# Altium schematic symbol library P_MOSFET.SchLib: 9 symbols
Pins are listed as number, name and electrical type; pins without a type are passive.

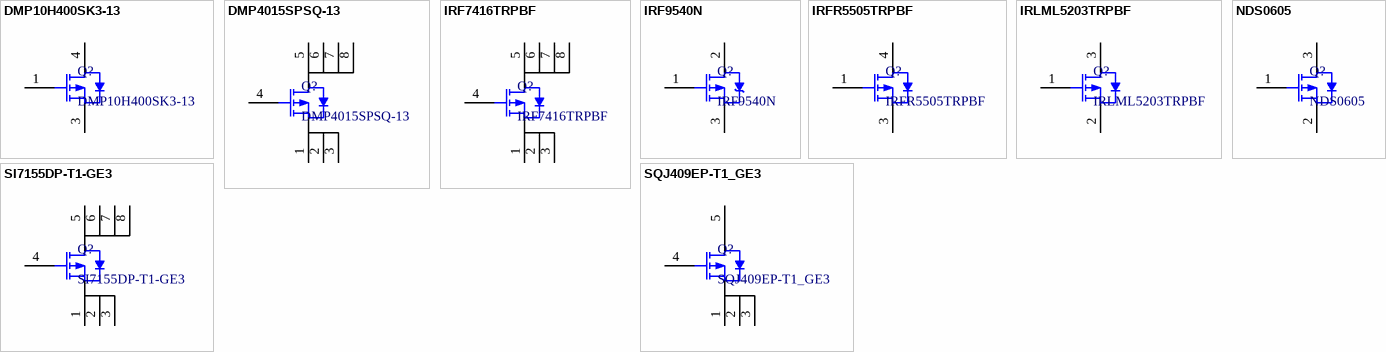
[diagram p0: symbols DMP10H400SK3-13 to SQJ409EP-T1_GE3]

## DMP10H400SK3-13
designator Q?
100V 9A 42W 240mΩ@10V,5A 3V@250uA P Channel TO-252-2 MOSFETs ROHS; Manufacturer: Diodes Incorporated; Drain to Source Voltage (Vdss): -100V; Gate Threshold Voltage (Vth): -1 V; Gate-to-Source Voltage (VGS): ±20V; Drain-to-Source On-Resistance: 240 mOhms; Continuous Drain Current: -9 A; Total Gate Charge: 17.5 nC; FET Type: P-Channel; Power Dissipation: 42 W; ComponentLink1Description: Datasheet; ComponentLink1URL: https://www.lcsc.com/datasheet/lcsc_datasheet_2005180933_Diodes-Incorporated-DMP10H400SK3-13_C177034.pdf; Supplier 1 URL: https://www.mouser.vn/ProductDetail/Diodes-Incorporated/DMP10H400SK3-13?qs=wo71MgyKIyFqONaMc85PEA%3D%3D; Supplier 2 URL: N/A; Supplier 3 URL: N/A; Value: DMP10H400SK3-13; Manufacturer Part Number: DMP10H400SK3-13; Mount: SMD/SMT; Operating Temperature Max: + 85 C; Operating Temperature Min: - 40 C; Package / Case: DPAK-3 (TO-252-3); Packaging: Tape and Reel; Supplier 1: Mouser; Supplier 1 Part Number: 621-DMP10H400SK3-13; Supplier 2: Digi-Key; Supplier 2 Part Number: N/A; Supplier 3: thegioiic; Supplier 3 Part Number: N/A; LCSC Part #: C177034
footprint TO-252-3 (D-PAK, 3-Pads, Body 6.20x6.54mm (max), IPC Medium Density)
pins: 1 G, 3 S, 4 D

## DMP4015SPSQ-13
designator Q?
MOSFET P-CH 40V 11A PowerDI5060-8; Manufacturer: Diodes Incorporated; Continuous Drain Current: -8.5 A; Drain to Source Voltage (Vdss): -40 V; Drain-to-Source On-Resistance: 15 mOhms; FET Type: P-Channel; Gate Threshold Voltage (Vth): -1.5 V; Gate-to-Source Voltage (VGS): ±25V; Power Dissipation: 1.3 W; Total Gate Charge: 47.5 nC; ComponentLink1Description: Datasheet; ComponentLink1URL: https://www.lcsc.com/datasheet/C384564.pdf?spm=wm.fly.bg.50.pdf&lcsc_vid=FlkIUABWQVJeAgZfQwdWUlcFT1ZYUV1ST1deUwVWQ1IxVlNfRVRZVVNVR1BYUztW; LCSC Part #: C384564; Manufacturer Part Number: DMP4015SPSQ-13; Mount: SMD/SMT; Operating Temperature Max: + 85 C; Operating Temperature Min: - 40 C; Package / Case: PowerDI5060-8; Packaging: Tape and Reel; Supplier 1 Part Number: 621-DMP4015SPSQ-13; Supplier 1 URL: https://www.mouser.vn/en/ProductDetail/Diodes-Incorporated/DMP4015SPSQ-13?qs=DBvH5xl4UymGq%252BG09rHkpA%3D%3D; Supplier 1: Mouser; Supplier 2 Part Number: DMP4015SPSQ-13DITR-ND; Supplier 2 URL: https://www.digikey.com/en/products/detail/diodes-incorporated/dmp4015spsq-13/5514393; Supplier 2: Digi-Key; Supplier 3 Part Number: N/A; Supplier 3 URL: N/A; Supplier 3: thegioiic; Value: DMP4015SPSQ-13
footprint DMP4015SPSQ-13
pins: 1 S, 2 S, 3 S, 4 G, 5 D, 6 D, 7 D, 8 D

## IRF7416TRPBF
designator Q?
MOSFET P-CH 30V 10A SO-8; Manufacturer: Infineon Technologies; Continuous Drain Current: -10 A; Drain to Source Voltage (Vdss): -30 V; Drain-to-Source On-Resistance: 20 mOhms; FET Type: P-Channel; Gate Threshold Voltage (Vth): -1 V; Gate-to-Source Voltage (VGS): ±20V; Power Dissipation: 2.5 W; Total Gate Charge: 92 nC; ComponentLink1Description: Datasheet; ComponentLink1URL: https://www.lcsc.com/datasheet/C3000.pdf?spm=wm.fly.bg.0.pdf___wm.fly.tp.2.ml&lcsc_vid=FlkIUABWQVJeAgZfQwdWUlcFT1ZYUV1ST1deUwVWQ1IxVlNfRVRZVVNVR1BYUztW; LCSC Part #: C3000; Manufacturer Part Number: IRF7416TRPBF; Mount: SMD/SMT; Operating Temperature Max: + 85 C; Operating Temperature Min: - 40 C; Package / Case: SO-8; Packaging: Tape and Reel; Supplier 1 Part Number: 942-IRF7416TRPBF; Supplier 1 URL: https://www.mouser.vn/en/ProductDetail/Infineon-Technologies/IRF7416TRPBF?qs=9%252BKlkBgLFf1tuhXoEVAcyA%3D%3D; Supplier 1: Mouser; Supplier 2 Part Number: IRF7416TRPBFTR-ND; Supplier 2 URL: https://www.digikey.com/en/products/detail/infineon-technologies/irf7416trpbf/856470; Supplier 2: Digi-Key; Supplier 3 Part Number: N/A; Supplier 3 URL: N/A; Supplier 3: thegioiic; Value: IRF7416TRPBF
footprint IRF7416TRPBF_SO-8 (SOIC, 8-Leads, Body 4.90x3.90mm, Pitch 1.27mm, IPC Medium Density)
pins: 1 S, 2 S, 3 S, 4 G, 5 D, 6 D, 7 D, 8 D

## IRF9540N
designator Q?
MOSFET MOSFT PCh -100V -23A 117mOhm 64.7nC; Manufacturer: Infineon Technologies; Gate-to-Source Voltage (VGS): ±20V; Total Gate Charge: 97 nC; Power Dissipation: 140W; FET Type: P-Channel; Drain-to-Source On-Resistance: 117 mOhms; Drain to Source Voltage (Vdss): -100V; Gate Threshold Voltage (Vth): N/A; Continuous Drain Current: -23A; ComponentLink1Description: Datasheet; ComponentLink1URL: https://www.mouser.vn/datasheet/2/196/Infineon_IRF9540N_DataSheet_v01_01_EN-3166147.pdf; Supplier 1 URL: https://www.mouser.vn/ProductDetail/Infineon-Technologies/IRF9540NPBF?qs=9%252BKlkBgLFf0vnuA8mxUPtw%3D%3D; Supplier 2 URL: https://www.digikey.com/en/products/detail/infineon-technologies/IRF9540NPBF/812088; Supplier 3 URL: https://www.thegioiic.com/irf9540npbf-mosfet-kenh-p-100v-19a-to-220ab; Value: IRF9540N; Manufacturer Part Number: IRF9540N; Mount: SMD/SMT; Operating Temperature Max: + 85 C; Operating Temperature Min: - 40 C; Package / Case: TO-220AB; Packaging: Tape and Reel; Supplier 1: Mouser; Supplier 1 Part Number: 942-IRF9540NPBF; Supplier 2: Digi-Key; Supplier 2 Part Number: IRF9540NPBF-ND; Supplier 3: thegioiic; Supplier 3 Part Number: N/A; LCSC Part #: N/A
footprint IRF9540N-TO-220AB
pins: 1 G, 2 D, 3 S

## IRFR5505TRPBF
designator Q?
55V 18A 110mΩ@10V,9.6A 57W 4V 1 piece P-channel TO-252-2(DPAK) MOSFETs ROHS; Manufacturer: Infineon Technologies; Drain to Source Voltage (Vdss): -55 V; Gate Threshold Voltage (Vth): -4 V; Gate-to-Source Voltage (VGS): ±20V; Drain-to-Source On-Resistance: 110 mOhms; Continuous Drain Current: -18 A; Total Gate Charge: 32 nC; Power Dissipation: 57 W; FET Type: P-Channel; ComponentLink1Description: Datasheet; ComponentLink1URL: https://www.lcsc.com/datasheet/lcsc_datasheet_2410121513_Infineon-Technologies-IRFR5505TRPBF_C26340.pdf; Supplier 1 URL: https://www.mouser.vn/ProductDetail/Infineon-Technologies/IRFR5505TRPBF?qs=NFlznGuI712wZwFPKrLjFg%3D%3D; Supplier 2 URL: N/A; Supplier 3 URL: N/A; Value: IRFR5505TRPBF; Manufacturer Part Number: IRFR5505TRPBF; Mount: SMD/SMT; Operating Temperature Max: + 85 C; Operating Temperature Min: - 40 C; Package / Case: DPAK-3 (TO-252-3); Packaging: Tape and Reel; Supplier 1: Mouser; Supplier 1 Part Number: 942-IRFR5505TRPBF; Supplier 2: Digi-Key; Supplier 2 Part Number: N/A; Supplier 3: thegioiic; Supplier 3 Part Number: N/A; LCSC Part #: C26340
footprint TO-252-3 (D-PAK, 3-Pads, Body 6.20x6.54mm (max), IPC Medium Density)
pins: 1 G, 3 S, 4 D

## IRLML5203TRPBF
designator Q?
MOSFET MOSFT P-Ch -30V -3A 98mOhm 9.5nC Log Lvl; Manufacturer: Infineon Technologies; Gate Threshold Voltage (Vth): -4 V; Gate-to-Source Voltage (VGS): ±20V; Drain-to-Source On-Resistance: 165 mOhms; Power Dissipation: 1.25 W; FET Type: P-Channel; Drain to Source Voltage (Vdss): -30 V; Continuous Drain Current: -3 A; Total Gate Charge: 9.5 nC; ComponentLink1Description: Datasheet; ComponentLink1URL: https://www.mouser.com/datasheet/2/196/Infineon_IRLML5203_DataSheet_v01_01_EN-3363405.pdf; Supplier 1 URL: https://www.mouser.com/ProductDetail/Infineon-Technologies/IRLML5203TRPBF?qs=9%252BKlkBgLFf2C8TWZ3Ajzqg%3D%3D; Supplier 2 URL: N/A; Supplier 3 URL: N/A; Value: IRLML5203TRPBF; Manufacturer Part Number: IRLML5203TRPBF; Mount: SMD/SMT; Operating Temperature Max: + 150 C; Operating Temperature Min: - 55 C; Package / Case: SOT-23-3; Packaging: Tape and Reel; Supplier 1: Mouser; Supplier 1 Part Number: 942-IRLML5203TRPBF; Supplier 2: Digi-Key; Supplier 2 Part Number: N/A; Supplier 3: thegioiic; Supplier 3 Part Number: N/A; LCSC Part #: C2592
footprint IRLML5203TRPBF (SOT23, 3-Leads, Body 2.92x2.37mm, Pitch 0.95mm, IPC Medium Density)
pins: 1 G, 2 S, 3 D

## NDS0605
designator Q?
60V 180mA 5Ω@10V,0.5A 360mW 1.7V@250uA 1 Piece P-Channel SOT-23 MOSFETs ROHS; Manufacturer: onsemi; Drain to Source Voltage (Vdss): -60 V; Gate Threshold Voltage (Vth): -3 V; Gate-to-Source Voltage (VGS): ±20V; Drain-to-Source On-Resistance: 5 Ohms; Continuous Drain Current: -180 mA; Total Gate Charge: 2.5 nC; Power Dissipation: 360 mW; FET Type: P-Channel; ComponentLink1Description: Datasheet; ComponentLink1URL: https://www.mouser.vn/datasheet/2/308/1/NDS0605_D-2317892.pdf; Supplier 1 URL: https://www.mouser.vn/ProductDetail/onsemi-Fairchild/NDS0605?qs=FOlmdCx%252BAA3MLJlVAfYlkA%3D%3D; Supplier 2 URL: N/A; Supplier 3 URL: N/A; Value: NDS0605; Manufacturer Part Number: NDS0605; Mount: SMD/SMT; Operating Temperature Max: + 150 C; Operating Temperature Min: - 55 C; Package / Case: SOT-23-3; Packaging: Tape and Reel; Supplier 1: Mouser; Supplier 1 Part Number: 512-NDS0605; Supplier 2: Digi-Key; Supplier 2 Part Number: N/A; Supplier 3: thegioiic; Supplier 3 Part Number: N/A; LCSC Part #: C124476
footprint NDS0605 (SOT23, 3-Leads, Body 2.92x2.37mm, Pitch 0.95mm, IPC Medium Density)
pins: 1 G, 2 S, 3 D

## SI7155DP-T1-GE3
designator Q?
MOSFET P-CH 40V 100A PowerPAKSO-8; Manufacturer: VISHAY; Continuous Drain Current: -100 A; Drain to Source Voltage (Vdss): -40 V; Drain-to-Source On-Resistance: 3.6 mOhms; FET Type: P-Channel; Gate Threshold Voltage (Vth): 2.3 V; Gate-to-Source Voltage (VGS): ±20V; Power Dissipation: 104 W; Total Gate Charge: 220 nC; ComponentLink1Description: Datasheet; ComponentLink1URL: https://www.lcsc.com/datasheet/C727776.pdf?spm=wm.fly.bg.14.pdf&lcsc_vid=FlkIUABWQVJeAgZfQwdWUlcFT1ZYUV1ST1deUwVWQ1IxVlNfRFJaX1FQR1haUDsOAxUeFF5JWBYZEEoKFBINSQcJGk4NBhADEA4cHktXQ1JdSQwSGg0%3D; LCSC Part #: C2927416; Manufacturer Part Number: SI7155DP-T1-GE3; Mount: SMD/SMT; Operating Temperature Max: + 85 C; Operating Temperature Min: - 40 C; Package / Case: PowerPAKSO-8; Packaging: Tape and Reel; Supplier 1 Part Number: 78-SI7155DP-T1-GE3; Supplier 1 URL: https://www.mouser.vn/en/ProductDetail/Vishay-Siliconix/SI7155DP-T1-GE3?qs=r5DSvlrkXmLY6HWae3SWCg%3D%3D; Supplier 1: Mouser; Supplier 2 Part Number: SI7155DP-T1-GE3TR-ND; Supplier 2 URL: https://www.digikey.com/en/products/detail/vishay-siliconix/si7155dp-t1-ge3/8572024; Supplier 2: Digi-Key; Supplier 3 Part Number: N/A; Supplier 3 URL: N/A; Supplier 3: thegioiic; Value: SI7155DP-T1-GE3
footprint SI7155DP-T1-GE3_PowerPAKSO-8 (BSC070N10NS5)
pins: 1 S, 2 S, 3 S, 4 G, 5 D, 6 D, 7 D, 8 D

## SQJ409EP-T1_GE3
designator Q?
MOSFET P-CH 40V 60A PowerPAK-SO-8L; Manufacturer: VISHAY; Continuous Drain Current: -60 A; Drain to Source Voltage (Vdss): -40 V; Drain-to-Source On-Resistance: 7 mOhms; FET Type: P-Channel; Gate Threshold Voltage (Vth): 2 V; Gate-to-Source Voltage (VGS): ±20V; Power Dissipation: 68 W; Total Gate Charge: 170 nC; ComponentLink1Description: Datasheet; ComponentLink1URL: https://www.lcsc.com/datasheet/C727776.pdf?spm=wm.fly.bg.14.pdf&lcsc_vid=FlkIUABWQVJeAgZfQwdWUlcFT1ZYUV1ST1deUwVWQ1IxVlNfRFJaX1FQR1haUDsOAxUeFF5JWBYZEEoKFBINSQcJGk4NBhADEA4cHktXQ1JdSQwSGg0%3D; LCSC Part #: C727776; Manufacturer Part Number: SQJ409EP-T1_GE3; Mount: SMD/SMT; Operating Temperature Max: + 85 C; Operating Temperature Min: - 40 C; Package / Case: PowerPAK-SO-8L; Packaging: Tape and Reel; Supplier 1 Part Number: 78-SQJ409EP-T1_GE3; Supplier 1 URL: https://www.mouser.vn/en/ProductDetail/Vishay-Semiconductors/SQJ409EP-T1_GE3?qs=5aG0NVq1C4wKikYg4x7ZRQ%3D%3D; Supplier 1: Mouser; Supplier 2 Part Number: SQJ409EP-T1_GE3TR-ND; Supplier 2 URL: https://www.digikey.com/en/products/detail/vishay-siliconix/SQJ409EP-T1-GE3/7326286?s=N4IgTCBcDaIMoEUBSAWADATgKIAUC0AKgIwD6A4lgMwgC6AvkA; Supplier 2: Digi-Key; Supplier 3 Part Number: N/A; Supplier 3 URL: N/A; Supplier 3: thegioiic; Value: SQJ409EP-T1_GE3
footprint SQJ409EP_PowerPAK-SO-8L (TO, 5-Pads, Body 5.34x5.86mm (max), IPC Medium Density)
pins: 1 S, 2 S, 3 S, 4 G, 5 D